# Altium footprint library Car_dirver.PcbLib: 21 footprints (part 2 of 2)
Each footprint in its own frame and in the unit in brackets; x right, y up, seen from the top. Pads: shape width x height; smd on the part's side, far side on the other; paste and mask are expansions set on the pad; w line width, h text height; cw(c..) or ccw(c..) is an arc to the next point about the centre after c.
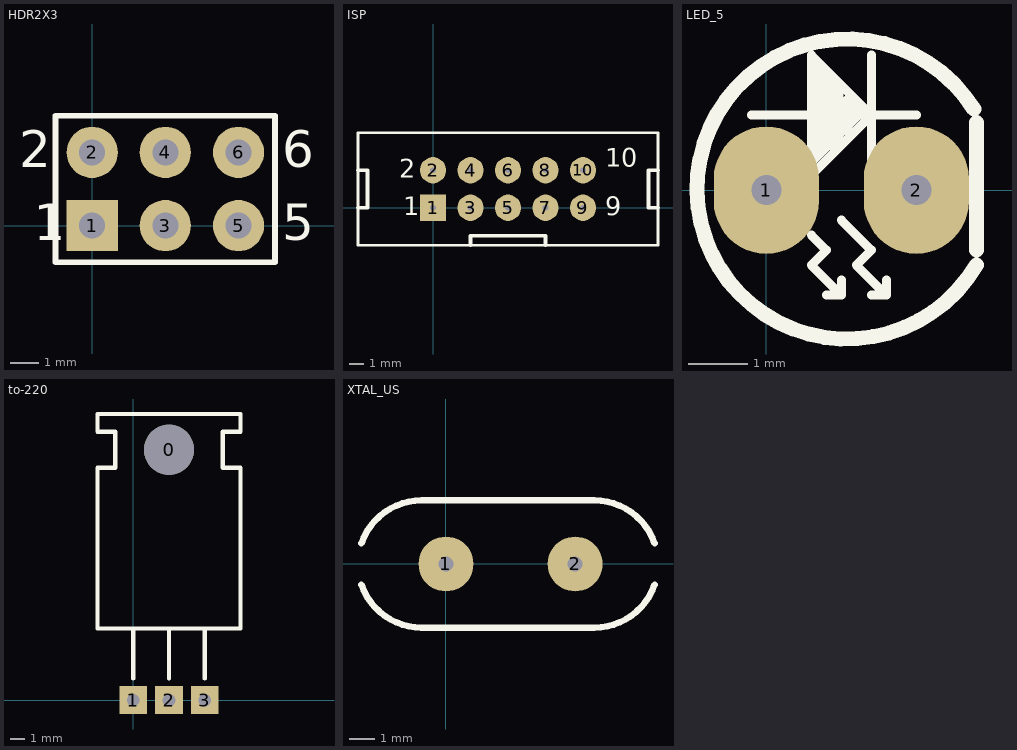
[diagram p1: the footprints below, top view; thin cyan lines are the x and y axes]

## HDR2X3 [mil] "Connector; Header; 3x2 Position"
height 401.57
pads (6):
  rect 70x70 hole 35.43 unplated: 1(0,0)
  round 70 hole 35.43 unplated: 2(0,100) 3(100,0) 4(100,100) 5(200,0) 6(200,100)
Top Overlay:
  lines w7.87: 58.33,-50 250,-50 ; 250,-50 250,150 -50,150 -50,-50 250,-50
  text "6" at 260,80 h50
  text "5" at 260,-20 h50
  text "2" at -100,80 h50
  text "1" at -80,-20 h50

## ISP [mil]
pads (10):
  rect 70x70 hole 15: 1(0,0)
  round 70 hole 15: 2(0,100) 3(100,0) 4(100,100) 5(200,0) 6(200,100) 7(300,0) 8(300,100) 9(400,0) 10(400,100)
Top Overlay:
  lines w7.87: -200,-100 -200,200 600,200 600,-100 -200,-100
  lines w10: -200,0 -175,0 -175,5 -175,100 -200,100 ; 100,-100 100,-75 300,-75 300,-100 ; 600,0 575,0 575,100 600,100
  text "2" at -90,80 h50
  text "1" at -80,-20 h50
  text "9" at 460,-20 h50
  text "10" at 460,110 h50

## LED_5 [mil]
height 401.57
pads (2):
  oval 70x85 hole 20 unplated: 1(0,0) 2(100,0)
Top Overlay:
  rectangle: 30,26.8 46.8,72
  lines w5: 49.06,70.94 49.06,29.06 55,35 55,61.77 ; 53.49,53.54 52,52.06 59,52.06 55,56.06 55,49.89 55,43 ; 55,43 35.48,23.48 35.48,78 41.24,72.24 41.24,78.24 33.8,70.8 33.8,79.8 32,78 32,20 61,49 61,55.77 55,61.77 ; 55,43 55,61.77 ; 55,43 49.06,48.94 49.06,55.83 55,61.77
  lines w6: -10,50 100,50 ; 30,-30 40,-40 30,-50 50,-70 ; 30,30 30,33.07 ; 40,-70 50,-70 ; 50,-60 50,-70 ; 50,-20 70,-40 60,-50 80,-70 ; 70,-70 80,-70 ; 70,10 70,90 ; 80,-60 80,-70 ; 30,10 70,50 30,90 30,10
  lines w10: 138.42,54 ccw(c53.81,0.7) 140,-50 ; 140,-40 140,45

## to-220 [mil]
pads (4):
  round 140 hole 140: 0(100,700)
  rect 78x78 hole 35: 1(0,0) 2(100,0) 3(200,0)
Top Overlay:
  lines w12: 0,60 0,200 ; 100,60 100,200 ; 200,60 200,200 ; -100,200 300,200 300,650 250,650 250,750 300,750 300,800 -100,800 -100,750 -50,750 -50,650 -100,650 -100,200

## XTAL_US [mil]
height 401.57
pads (2):
  round 85 hole 23.62: 1(0,0) 2(200,0)
Top Overlay:
  lines w10: -130.92,-31.85 ccw(c-37.79,0) -37.79,-98.43 ; -130.92,31.85 cw(c-37.79,0) -37.79,98.42 229.92,98.42 cw(c229.92,0) 323.05,31.85 ; -38,-98.42 229.92,-98.43 ccw(c229.92,0) 323.05,-31.85